# Altium schematic symbol library RES,2k,1%,0.1W,0603.Schlib: 1 symbol
Pins are listed as number, name and electrical type; pins without a type are passive.

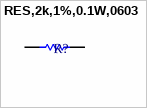
[diagram p0: symbol RES,2k,1%,0.1W,0603]

## RES,2k,1%,0.1W,0603
designator R?
pins: 1, 2